# Altium footprint library header.PcbLib: 139 footprints (part 9 of 9)
Each footprint in its own frame and in the unit in brackets; x right, y up, seen from the top. Pads: shape width x height; smd on the part's side, far side on the other; paste and mask are expansions set on the pad; w line width, h text height; cw(c..) or ccw(c..) is an arc to the next point about the centre after c.
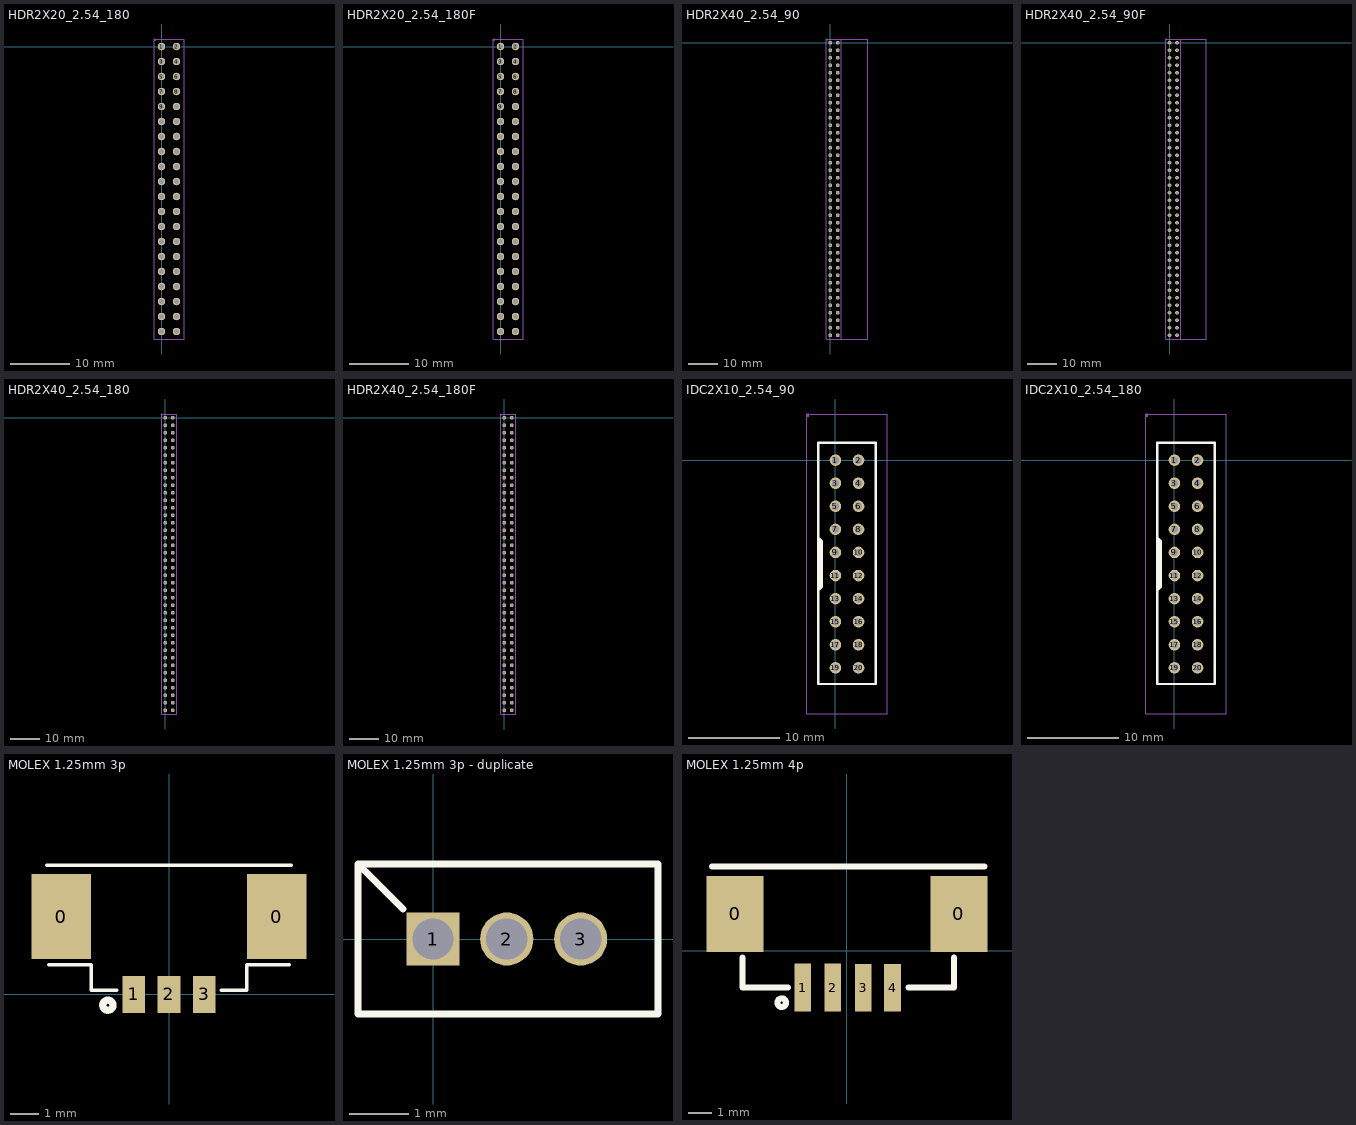
[diagram p8: the footprints below, top view; thin cyan lines are the x and y axes]

## HDR2X20_2.54_180 [mil]
height 169.29
pads (40):
  round 50 hole 32: 1(0,0) 2(100,0) 3(0,-100) 4(100,-100) 5(0,-200) 6(100,-200) 7(0,-300) 8(100,-300) 9(0,-400) 10(100,-400) 11(0,-500) 12(100,-500) 13(0,-600) 14(100,-600) 15(0,-700) 16(100,-700) 17(0,-800) 18(100,-800) 19(0,-900) 20(100,-900) 21(0,-1000) 22(100,-1000) 23(0,-1100) 24(100,-1100) 25(0,-1200) 26(100,-1200) 27(0,-1300) 28(100,-1300) 29(0,-1400) 30(100,-1400) 31(0,-1500) 32(100,-1500) 33(0,-1600) 34(100,-1600) 35(0,-1700) 36(100,-1700) 37(0,-1800) 38(100,-1800) 39(0,-1900) 40(100,-1900)
Mechanical 13:
  lines w2: -50,-1950 -50,50 150,50 150,-1950 -50,-1950
Top Component (Mech14):
  circle w2: c-45,45 r5
  region: -45,40 -45.99,40 -47.83,40.76 -49.24,42.17 -50,44.01 -50,45 -50,45.99 -49.24,47.83 -47.83,49.24 -45.99,50 -45,50 -44.01,50 -42.17,49.24 -40.76,47.83 -40,45.99 -40,45 -40,44.01 -40.76,42.17 -42.17,40.76 -44.01,40
  lines w2: -50,-1950 -50,50 150,50 150,-1950 -50,-1950
  text ".Designator" at 19,-970 h80
3D body "pin_header_awl254-dg-g40d.stp": height 334.65, standoff -118.11, extent -49.99,-1950 150.01,50

## HDR2X20_2.54_180F [mil]
height 169.29
pads (40):
  round 50 hole 32: 1(0,0) 2(100,0) 3(0,-100) 4(100,-100) 5(0,-200) 6(100,-200) 7(0,-300) 8(100,-300) 9(0,-400) 10(100,-400) 11(0,-500) 12(100,-500) 13(0,-600) 14(100,-600) 15(0,-700) 16(100,-700) 17(0,-800) 18(100,-800) 19(0,-900) 20(100,-900) 21(0,-1000) 22(100,-1000) 23(0,-1100) 24(100,-1100) 25(0,-1200) 26(100,-1200) 27(0,-1300) 28(100,-1300) 29(0,-1400) 30(100,-1400) 31(0,-1500) 32(100,-1500) 33(0,-1600) 34(100,-1600) 35(0,-1700) 36(100,-1700) 37(0,-1800) 38(100,-1800) 39(0,-1900) 40(100,-1900)
Mechanical 13:
  lines w2: -50,-1950 150,-1950 150,50 -50,50 -50,-1950
Top Component (Mech14):
  circle w2: c-45,45 r5
  region: -45,40 -45.99,40 -47.83,40.76 -49.24,42.17 -50,44.01 -50,45 -50,45.99 -49.24,47.83 -47.83,49.24 -45.99,50 -45,50 -44.01,50 -42.17,49.24 -40.76,47.83 -40,45.99 -40,45 -40,44.01 -40.76,42.17 -42.17,40.76 -44.01,40
  lines w2: -50,-1950 -50,50 150,50 150,-1950 -50,-1950
  text ".Designator" at 19,-970 h80
3D body "female_header_a-bl254-dg-g40d.stp": height 334.65, standoff -125.98, extent -48.42,-1954.92 148.43,54.92

## HDR2X40_2.54_90 [mil]
height 169.29
pads (80):
  round 50 hole 32: 1(0,0) 2(100,0) 3(0,-100) 4(100,-100) 5(0,-200) 6(100,-200) 7(0,-300) 8(100,-300) 9(0,-400) 10(100,-400) 11(0,-500) 12(100,-500) 13(0,-600) 14(100,-600) 15(0,-700) 16(100,-700) 17(0,-800) 18(100,-800) 19(0,-900) 20(100,-900) 21(0,-1000) 22(100,-1000) 23(0,-1100) 24(100,-1100) 25(0,-1200) 26(100,-1200) 27(0,-1300) 28(100,-1300) 29(0,-1400) 30(100,-1400) 31(0,-1500) 32(100,-1500) 33(0,-1600) 34(100,-1600) 35(0,-1700) 36(100,-1700) 37(0,-1800) 38(100,-1800) 39(0,-1900) 40(100,-1900) 41(0,-2000) 42(100,-2000) 43(0,-2100) 44(100,-2100) 45(0,-2200) 46(100,-2200) 47(0,-2300) 48(100,-2300) 49(0,-2400) 50(100,-2400) 51(0,-2500) 52(100,-2500) 53(0,-2600) 54(100,-2600) 55(0,-2700) 56(100,-2700) 57(0,-2800) 58(100,-2800) 59(0,-2900) 60(100,-2900) 61(0,-3000) 62(100,-3000) 63(0,-3100) 64(100,-3100) 65(0,-3200) 66(100,-3200) 67(0,-3300) 68(100,-3300) 69(0,-3400) 70(100,-3400) 71(0,-3500) 72(100,-3500) 73(0,-3600) 74(100,-3600) 75(0,-3700) 76(100,-3700) 77(0,-3800) 78(100,-3800) 79(0,-3900) 80(100,-3900)
Mechanical 13:
  lines w2: -50,-3950 500,-3950 500,50 -50,50 -50,-3950
Top Component (Mech14):
  circle w2: c-45,45 r5
  region: -45,40 -45.99,40 -47.83,40.76 -49.24,42.17 -50,44.01 -50,45 -50,45.99 -49.24,47.83 -47.83,49.24 -45.99,50 -45,50 -44.01,50 -42.17,49.24 -40.76,47.83 -40,45.99 -40,45 -40,44.01 -40.76,42.17 -42.17,40.76 -44.01,40
  lines w2: -50,-3950 -50,50 150,50 150,-3950 -50,-3950
  text ".Designator" at 19,-1970 h80
3D body "pin_header_awl254-da-g80d.stp": height 198.43, standoff -116.54, extent -12.44,-3945 494.64,55

## HDR2X40_2.54_90F [mil]
height 169.29
pads (80):
  round 50 hole 32: 1(0,0) 2(100,0) 3(0,-100) 4(100,-100) 5(0,-200) 6(100,-200) 7(0,-300) 8(100,-300) 9(0,-400) 10(100,-400) 11(0,-500) 12(100,-500) 13(0,-600) 14(100,-600) 15(0,-700) 16(100,-700) 17(0,-800) 18(100,-800) 19(0,-900) 20(100,-900) 21(0,-1000) 22(100,-1000) 23(0,-1100) 24(100,-1100) 25(0,-1200) 26(100,-1200) 27(0,-1300) 28(100,-1300) 29(0,-1400) 30(100,-1400) 31(0,-1500) 32(100,-1500) 33(0,-1600) 34(100,-1600) 35(0,-1700) 36(100,-1700) 37(0,-1800) 38(100,-1800) 39(0,-1900) 40(100,-1900) 41(0,-2000) 42(100,-2000) 43(0,-2100) 44(100,-2100) 45(0,-2200) 46(100,-2200) 47(0,-2300) 48(100,-2300) 49(0,-2400) 50(100,-2400) 51(0,-2500) 52(100,-2500) 53(0,-2600) 54(100,-2600) 55(0,-2700) 56(100,-2700) 57(0,-2800) 58(100,-2800) 59(0,-2900) 60(100,-2900) 61(0,-3000) 62(100,-3000) 63(0,-3100) 64(100,-3100) 65(0,-3200) 66(100,-3200) 67(0,-3300) 68(100,-3300) 69(0,-3400) 70(100,-3400) 71(0,-3500) 72(100,-3500) 73(0,-3600) 74(100,-3600) 75(0,-3700) 76(100,-3700) 77(0,-3800) 78(100,-3800) 79(0,-3900) 80(100,-3900)
Mechanical 13:
  lines w2: -50,-3950 490,-3950 490,50 -50,50 -50,-3950
Top Component (Mech14):
  circle w2: c-45,45 r5
  region: -45,40 -45.99,40 -47.83,40.76 -49.24,42.17 -50,44.01 -50,45 -50,45.99 -49.24,47.83 -47.83,49.24 -45.99,50 -45,50 -44.01,50 -42.17,49.24 -40.76,47.83 -40,45.99 -40,45 -40,44.01 -40.76,42.17 -42.17,40.76 -44.01,40
  lines w2: -50,-3950 -50,50 150,50 150,-3950 -50,-3950
  text ".Designator" at 19,-1970 h80
3D body "female_header_a-bl254-da-g80d.stp": height 198.43, standoff -124.41, extent -10,-3949.92 486.06,59.92

## HDR2X40_2.54_180 [mil]
height 169.29
pads (80):
  round 50 hole 32: 1(0,0) 2(100,0) 3(0,-100) 4(100,-100) 5(0,-200) 6(100,-200) 7(0,-300) 8(100,-300) 9(0,-400) 10(100,-400) 11(0,-500) 12(100,-500) 13(0,-600) 14(100,-600) 15(0,-700) 16(100,-700) 17(0,-800) 18(100,-800) 19(0,-900) 20(100,-900) 21(0,-1000) 22(100,-1000) 23(0,-1100) 24(100,-1100) 25(0,-1200) 26(100,-1200) 27(0,-1300) 28(100,-1300) 29(0,-1400) 30(100,-1400) 31(0,-1500) 32(100,-1500) 33(0,-1600) 34(100,-1600) 35(0,-1700) 36(100,-1700) 37(0,-1800) 38(100,-1800) 39(0,-1900) 40(100,-1900) 41(0,-2000) 42(100,-2000) 43(0,-2100) 44(100,-2100) 45(0,-2200) 46(100,-2200) 47(0,-2300) 48(100,-2300) 49(0,-2400) 50(100,-2400) 51(0,-2500) 52(100,-2500) 53(0,-2600) 54(100,-2600) 55(0,-2700) 56(100,-2700) 57(0,-2800) 58(100,-2800) 59(0,-2900) 60(100,-2900) 61(0,-3000) 62(100,-3000) 63(0,-3100) 64(100,-3100) 65(0,-3200) 66(100,-3200) 67(0,-3300) 68(100,-3300) 69(0,-3400) 70(100,-3400) 71(0,-3500) 72(100,-3500) 73(0,-3600) 74(100,-3600) 75(0,-3700) 76(100,-3700) 77(0,-3800) 78(100,-3800) 79(0,-3900) 80(100,-3900)
Mechanical 13:
  lines w2: -50,-3950 -50,50 150,50 150,-3950 -50,-3950
Top Component (Mech14):
  circle w2: c-45,45 r5
  region: -45,40 -45.99,40 -47.83,40.76 -49.24,42.17 -50,44.01 -50,45 -50,45.99 -49.24,47.83 -47.83,49.24 -45.99,50 -45,50 -44.01,50 -42.17,49.24 -40.76,47.83 -40,45.99 -40,45 -40,44.01 -40.76,42.17 -42.17,40.76 -44.01,40
  lines w2: -50,-3950 150,-3950 150,50 -50,50 -50,-3950
  text ".Designator" at 19,-1970 h80

## HDR2X40_2.54_180F [mil]
height 169.29
pads (80):
  round 50 hole 32: 1(0,0) 2(100,0) 3(0,-100) 4(100,-100) 5(0,-200) 6(100,-200) 7(0,-300) 8(100,-300) 9(0,-400) 10(100,-400) 11(0,-500) 12(100,-500) 13(0,-600) 14(100,-600) 15(0,-700) 16(100,-700) 17(0,-800) 18(100,-800) 19(0,-900) 20(100,-900) 21(0,-1000) 22(100,-1000) 23(0,-1100) 24(100,-1100) 25(0,-1200) 26(100,-1200) 27(0,-1300) 28(100,-1300) 29(0,-1400) 30(100,-1400) 31(0,-1500) 32(100,-1500) 33(0,-1600) 34(100,-1600) 35(0,-1700) 36(100,-1700) 37(0,-1800) 38(100,-1800) 39(0,-1900) 40(100,-1900) 41(0,-2000) 42(100,-2000) 43(0,-2100) 44(100,-2100) 45(0,-2200) 46(100,-2200) 47(0,-2300) 48(100,-2300) 49(0,-2400) 50(100,-2400) 51(0,-2500) 52(100,-2500) 53(0,-2600) 54(100,-2600) 55(0,-2700) 56(100,-2700) 57(0,-2800) 58(100,-2800) 59(0,-2900) 60(100,-2900) 61(0,-3000) 62(100,-3000) 63(0,-3100) 64(100,-3100) 65(0,-3200) 66(100,-3200) 67(0,-3300) 68(100,-3300) 69(0,-3400) 70(100,-3400) 71(0,-3500) 72(100,-3500) 73(0,-3600) 74(100,-3600) 75(0,-3700) 76(100,-3700) 77(0,-3800) 78(100,-3800) 79(0,-3900) 80(100,-3900)
Top Component (Mech14):
  circle w2: c-45,45 r5
  region: -45,40 -45.99,40 -47.83,40.76 -49.24,42.17 -50,44.01 -50,45 -50,45.99 -49.24,47.83 -47.83,49.24 -45.99,50 -45,50 -44.01,50 -42.17,49.24 -40.76,47.83 -40,45.99 -40,45 -40,44.01 -40.76,42.17 -42.17,40.76 -44.01,40
  lines w2: -50,-3950 150,-3950 150,50 -50,50 -50,-3950
  text ".Designator" at 19,-1970 h80
3D body "female_header_a-bl254-dg-g80d.stp": height 334.65, standoff -125.98, extent -48.42,-3954.92 148.43,54.93

## IDC2X10_2.54_90 [mil]
height 169.29
pads (20):
  round 50 hole 32: 1(0,0) 2(100,0) 3(0,-100) 4(100,-100) 5(0,-200) 6(100,-200) 7(0,-300) 8(100,-300) 9(0,-400) 10(100,-400) 11(0,-500) 12(100,-500) 13(0,-600) 14(100,-600) 15(0,-700) 16(100,-700) 17(0,-800) 18(100,-800) 19(0,-900) 20(100,-900)
Top Overlay:
  region: -75,-335 -75,-565 -60,-550 -60,-350
  lines w10: -75,-565 -75,-335 ; -75,-565 -75,-970 175,-970 175,75 -75,75 -75,-335 ; -75,-565 -60,-550 -60,-350 -75,-335
Mechanical 13:
  lines w2: -125,-1100 -125,200 225,200 225,-1100 -125,-1100
Top Component (Mech14):
  circle w2: c-120,195 r5
  region: -120,190 -120.99,190 -122.83,190.76 -124.24,192.17 -125,194.01 -125,195 -125,195.99 -124.24,197.83 -122.83,199.24 -120.99,200 -120,200 -119.01,200 -117.17,199.24 -115.76,197.83 -115,195.99 -115,195 -115,194.01 -115.76,192.17 -117.17,190.76 -119.01,190
  lines w2: -125,-1100 225,-1100 225,200 -125,200 -125,-1100
  text ".Designator" at 19,-470 h80
3D body "User Library-idc-20-l_asm.STEP": height 363.79, standoff -85.03, extent -9.01,-1095 489.01,192.4

## IDC2X10_2.54_180 [mil]
height 169.29
pads (20):
  round 50 hole 32: 1(0,0) 2(100,0) 3(0,-100) 4(100,-100) 5(0,-200) 6(100,-200) 7(0,-300) 8(100,-300) 9(0,-400) 10(100,-400) 11(0,-500) 12(100,-500) 13(0,-600) 14(100,-600) 15(0,-700) 16(100,-700) 17(0,-800) 18(100,-800) 19(0,-900) 20(100,-900)
Top Overlay:
  region: -75,-335 -75,-565 -60,-550 -60,-350
  lines w10: -75,-565 -75,-335 ; -75,-565 -75,-970 175,-970 175,75 -75,75 -75,-335 ; -75,-565 -60,-550 -60,-350 -75,-335
Mechanical 13:
  lines w2: -125,-1100 -125,200 225,200 225,-1100 -125,-1100
Top Component (Mech14):
  circle w2: c-120,195 r5
  region: -120,190 -120.99,190 -122.83,190.76 -124.24,192.17 -125,194.01 -125,195 -125,195.99 -124.24,197.83 -122.83,199.24 -120.99,200 -120,200 -119.01,200 -117.17,199.24 -115.76,197.83 -115,195.99 -115,195 -115,194.01 -115.76,192.17 -117.17,190.76 -119.01,190
  lines w2: -125,-1100 225,-1100 225,200 -125,200 -125,-1100
  text ".Designator" at 19,-470 h80
3D body "User Library-idc-20_asm.STEP": height 400, standoff -80.31, extent -112,-1092.7 222.64,194.7

## MOLEX 1.25mm 3p [mm] "molex Pitch PicoBlade Header"
pads (5):
  rect 2.1x3 smd: 0(-3.8,2.746) 0(3.8,2.746)
  rect 0.8x1.3 smd: 1(-1.25,-0.003) 2(-0.001,-0.003) 3(1.25,-0.003)
Top Overlay:
  circle w0.254: c-2.159,-0.381 r0.18
  lines w0.12: -4.319,4.569 4.317,4.569 ; -4.25,1.047 -2.75,1.047 -2.75,0.147 -1.85,0.147 ; 1.85,0.147 2.75,0.147 2.75,1.047 4.25,1.047
3D body "532610371.stp": height 3.43, standoff 0.03, extent -4.45,-0.418 4.45,4.782

## MOLEX 1.25mm 3p - duplicate [mm] "molex Pitch PicoBlade Header"
pads (3):
  rect 0.9x0.9 hole 0.7: 1(0,0)
  round 0.9 hole 0.7: 2(1.25,0) 3(2.5,0)
Top Overlay:
  lines w0.12: -0.508,0.508 -1.27,1.27 ; -1.27,1.27 3.81,1.27 3.81,-1.27 -1.27,-1.27 -1.27,1.27

## MOLEX 1.25mm 4p [mm] "molex Pitch PicoBlade Header"
pads (6):
  rect 2.4x3.2 smd: 0(-4.696,1.545) 0(4.696,1.546)
  rect 0.7x2 smd: 1(-1.854,-1.544) 2(-0.604,-1.544) 3(0.688,-1.546) 4(1.914,-1.546)
Top Overlay:
  circle w0.254: c-2.741,-2.181 r0.18
  lines w0.254: -5.662,3.534 5.768,3.534 ; -4.392,-0.276 -4.392,-1.546 -2.487,-1.546 ; 2.593,-1.546 4.498,-1.546 4.498,-0.276